# Altium schematic symbol library Mov.SchLib: 5 symbols
Pins are listed as number, name and electrical type; pins without a type are passive.

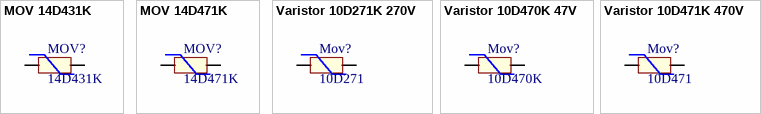
[diagram p0: symbols MOV 14D431K to Varistor 10D471K 470V]

## MOV 14D431K
designator MOV?, comment 14D431K
MOV-14DxxxK Series - Metal Oxide Varistor / 275V RMS, 350VDC.; ComponentLink1Description: Datasheet; ComponentLink1URL: https://www.bourns.com/docs/Product-Datasheets/MOV14D.pdf; Code: N/A
footprint MOV 14D431K (20 * 4.6 mm H*T)
pins: 1, 2

## MOV 14D471K
designator MOV?, comment 14D471K
MOV-14DxxxK Series - Metal Oxide Varistor / 300V RMS, 385VDC.; Code: 1422-004; ComponentLink1Description: Datasheet; ComponentLink1URL: https://www.bourns.com/docs/Product-Datasheets/MOV14D.pdf
footprint MOV 14D471K (16.5*5.4*20)
pins: 1, 2

## Varistor 10D271K 270V
designator Mov?, comment 10D271
MOV-10DxxxK Series - Metal Oxide Varistor; Code: 1422-010; Designed by: TranLuyen
footprint MOV-10D271 (Tu chong set)
pins: 1, 2

## Varistor 10D470K 47V
designator Mov?, comment 10D470K
MOV-10DxxxK Series - Metal Oxide Varistor; Code: N/A
footprint MOV-10D471 (Tu chong set)
pins: 1, 2

## Varistor 10D471K 470V
designator Mov?, comment 10D471
MOV-10DxxxK Series - Metal Oxide Varistor; Code: 1422-221; Designed by: TranLuyen
footprint MOV-10D471 (Tu chong set)
pins: 1, 2